# Altium schematic symbol library LM317.SchLib: 1 symbol
Pins are listed as number, name and electrical type; pins without a type are passive.

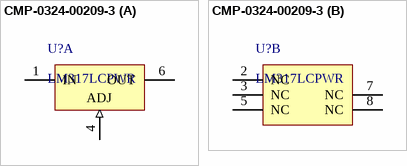
[diagram p0: symbol CMP-0324-00209-3]

## CMP-0324-00209-3
designator U?, comment LM317LCPWR
Adjustable Regulator with 3.7 to 38 V Input and 1.2 to 32 V Output, 0 to 125 degC, 8-Pin TSSOP (PW), Green (RoHS & no Sb/Br); Manufacturer: Texas Instruments; Iout(Max)(A): 0.1; Vin(Min)(V): 3.7; Vin(Max)(V): 38; Vout(Min)(V): 1.2; Vout(Max)(V): 32; DatasheetVersion: SLCS144D; Mounting Technology: Surface Mount; PartNumber: LM317LCPWR; PackageReference: PW0008A; ComponentLink2URL: http://www.ti.com/litv/pdf/mtss001d; Code_JEDEC: MO-153; PackageVersion: revG, Feb-2011; PackageDescription: 8-Pin Plastic Thin Small Outline Package 3 x 4.4 mm Body ,0.65 mm Pitch; Eco-Plan: Green (RoHS & no Sb/Br); ComponentLink2Description: Package Specification; ComponentLink1URL: http://www.ti.com/general/docs/lit/getliterature.tsp?genericPartNumber=LM317L&fileType=pdf; ComponentLink1Description: Datasheet; ComponentLink3URL: Samples URL:http://www.ti.com/product/lm317l#samples; ComponentLink3Description: URL Link1
footprint PW0008A_M (SOP, 8-Leads, Body 4.5x3.1mm, Pitch 0.65mm, IPC Low Density)
footprint PW0008A_N (SOP, 8-Leads, Body 4.5x3.1mm, Pitch 0.65mm, IPC Medium Density)
footprint PW0008A_L (SOP, 8-Leads, Body 4.5x3.1mm, Pitch 0.65mm, IPC High Density)
part A pins: 1 IN (power), 4 ADJ (in), 6 OUT (power)
part B pins: 2 NC, 3 NC, 5 NC, 7 NC, 8 NC